# Altium integrated library Crystal 32MHz 3225.IntLib: 1 symbol
Pins are listed as number, name and electrical type; pins without a type are passive.

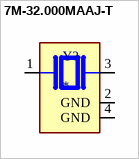
[diagram p0: symbol 7M-32.000MAAJ-T]

## 7M-32.000MAAJ-T
designator Y?
XTAL, 32.000MHZ, 18PF, SMD, 3.2X2.5; Frequency:32MHz; Frequency Tolerance:Â± 30ppm; Load Capacitance:18pF; Frequency Stability:Â± 30ppm; Operating Temperature Range:-20Â°C to +70Â°C; Crystal Mounting Type:SMD; Crystal Case Type:3.2mm x 2.5mm; No. of Pins:; MF: TXC CORPORATION; MP: 7M-32.000MAAJ-T; SnapEDA_Link: https://www.snapeda.com/parts/7M-32.000MAAJ-T/TXC/view-part/?ref=snap; Package: NON STANDARD-4 TXC; Value: *; Check_prices: https://www.snapeda.com/parts/7M-32.000MAAJ-T/TXC/view-part/?ref=eda
footprint XTAL_7M-32.000MAAJ-T
pins: 1, 2 GND (power), 3 2, 4 GND (power)